# Altium footprint library AHPR_Sensor_Board_Rev1_Footprints.PcbLib: 11 footprints
Each footprint in its own frame and in the unit in brackets; x right, y up, seen from the top. Pads: shape width x height; smd on the part's side, far side on the other; paste and mask are expansions set on the pad; w line width, h text height; cw(c..) or ccw(c..) is an arc to the next point about the centre after c.
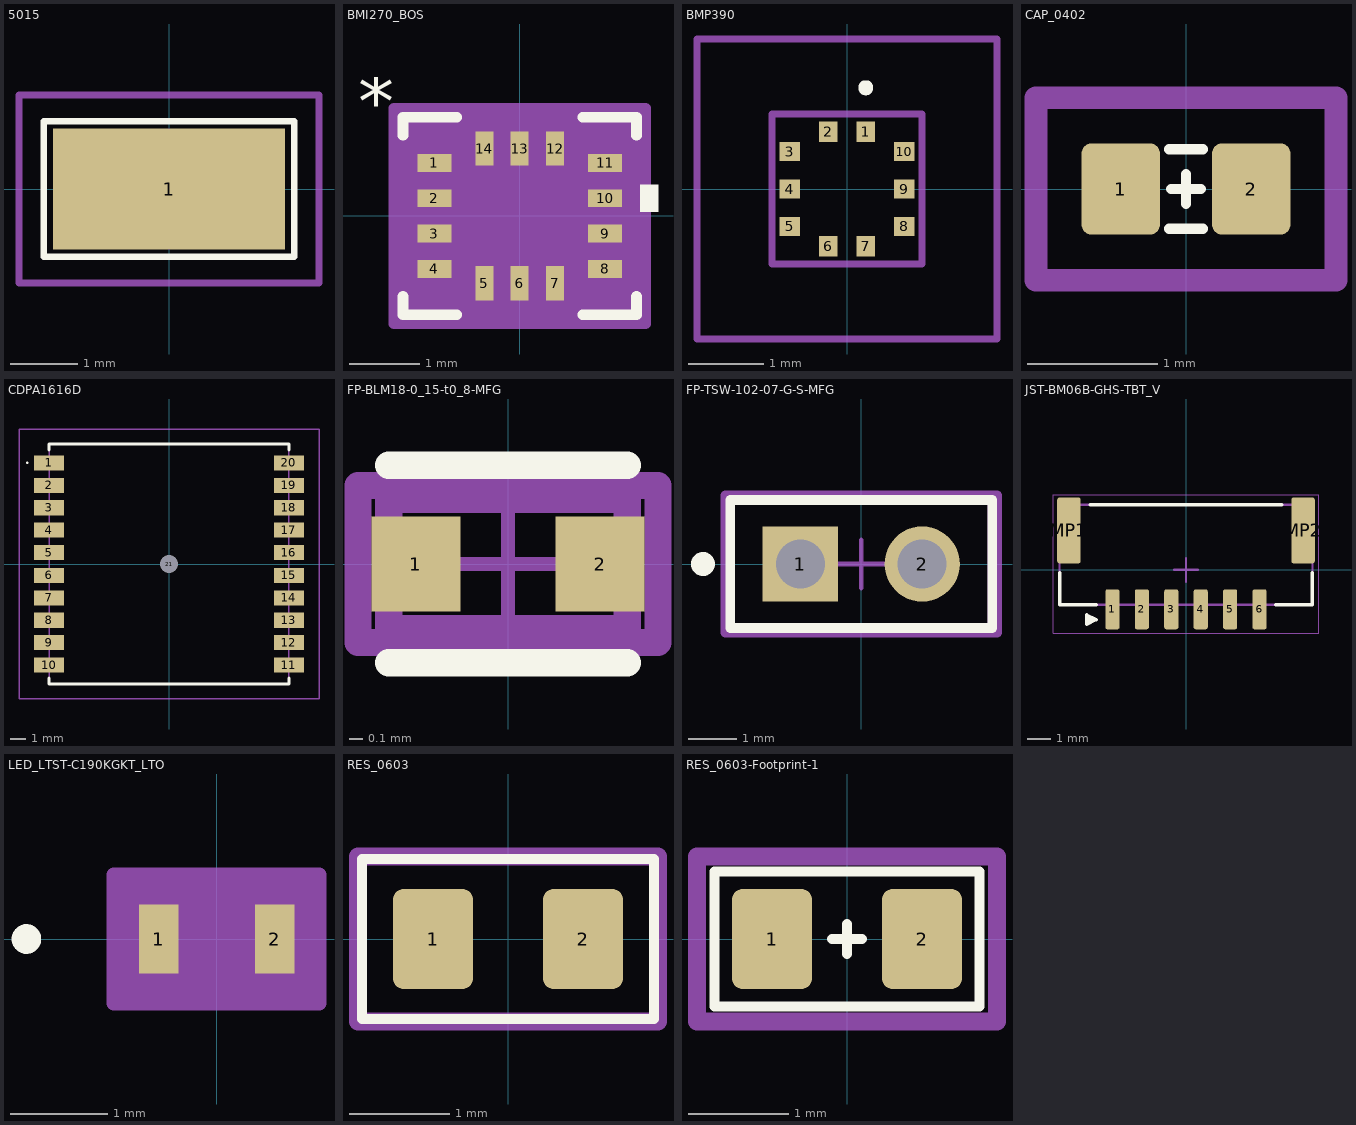
[diagram p0: the footprints below, top view; thin cyan lines are the x and y axes]

## 5015 [mm]
pads (1):
  rect 3.43x1.78 smd: 1(0,0)
Top Overlay:
  lines w0.1: -1.85,-1 1.85,-1 1.85,1 -1.85,1 -1.85,-1
Top Courtyard:
  lines w0.2: -1.335,-0.51 1.335,-0.51 1.335,0.51 -1.335,0.51 -1.335,-0.51
Bottom Assembly:
  lines w0.1: -2.215,-1.39 2.215,-1.39 2.215,1.39 -2.215,1.39 -2.215,-1.39
3D body "5015.stp": height 1.51, standoff 0.01, extent -1.349,-0.5 1.35,0.5

## BMI270_BOS [mil]
pads (14):
  rect 19x10 smd paste+0 mask+0: 1(-47.5,29.53) 2(-47.5,9.84) 3(-47.5,-9.84) 4(-47.5,-29.53) 8(47.5,-29.53) 9(47.5,-9.84) 10(47.5,9.84) 11(47.5,29.53)
  rect 10x19 smd paste+0 mask+0: 5(-19.68,-37.5) 6(0,-37.5) 7(19.68,-37.5) 12(19.68,37.5) 13(0,37.5) 14(-19.68,37.5)
Top Overlay:
  region: 67,17.34 77,17.34 77,2.34 67,2.34
  lines w6: -65,-44.9 -65,-55 -35.06,-55 ; -65,44.9 -65,55 -35.06,55 ; 35.06,-55 65,-55 65,-44.9 ; 35.06,55 65,55 65,44.9
  text "*" at -90,40 h50
Mechanical 13:
  lines w1: -60,0 -10,50 ; -60,-50 60,-50 60,50 -60,50 -60,-50 ; -60,-34.53 -60,-24.53 -57,-24.53 -57,-34.53 -60,-34.53 ; -60,-14.84 -60,-4.84 -57,-4.84 -57,-14.84 -60,-14.84 ; -60,4.84 -60,14.84 -57,14.84 -57,4.84 -60,4.84 ; -60,24.53 -60,34.53 -57,34.53 -57,24.53 -60,24.53 ; -24.68,-50 -14.69,-50 -14.69,-47 -24.68,-47 -24.68,-50 ; -24.68,47 -14.69,47 -14.69,50 -24.68,50 -24.68,47 ; -5,-50 5,-50 5,-47 -5,-47 -5,-50 ; -5,47 5,47 5,50 -5,50 -5,47 ; 14.69,-50 24.68,-50 24.68,-47 14.69,-47 14.69,-50 ; 14.69,47 24.68,47 24.68,50 14.69,50 14.69,47 ; 57,-34.53 60,-34.53 60,-24.53 57,-24.53 57,-34.53 ; 57,-14.84 60,-14.84 60,-4.84 57,-4.84 57,-14.84 ; 57,4.84 60,4.84 60,14.84 57,14.84 57,4.84 ; 57,24.53 60,24.53 60,34.53 57,34.53 57,24.53
  text "*" at -50.5,14.37 h50
Top Courtyard:
  region: -34.69,-60 -70,-60 -70,-44.53 -70,44.53 -70,60 -34.69,60 34.69,60 70,60 70,44.53 70,-44.53 70,-60 34.69,-60
  lines w6: -70,-60 -70,-44.53 -70,44.53 -70,60 -34.69,60 34.69,60 70,60 70,44.53 70,-44.53 70,-60 34.69,-60 -34.69,-60 -70,-60
3D body "BMI270_BOS.step": height 34.09, standoff 0, extent -60,-50 60,50

## BMP390 [mm]
pads (10):
  rect 0.25x0.275 smd: 1(0.25,0.763) 2(-0.25,0.763) 6(-0.25,-0.763) 7(0.25,-0.763)
  rect 0.275x0.25 smd: 3(-0.762,0.5) 4(-0.762,0) 5(-0.762,-0.5) 8(0.762,-0.5) 9(0.762,0) 10(0.762,0.5)
Top Overlay:
  lines w0.1: 0.25,1.3 cw(c0.25,1.35) 0.25,1.4 cw(c0.25,1.35) 0.25,1.3
Top Courtyard:
  lines w0.1: -1,-1 1,-1 1,1 -1,1 -1,-1
Bottom Assembly:
  lines w0.1: -2,-2 2,-2 2,2 -2,2 -2,-2
3D body "10LGA_2X2X0p75_BOS.step": height 0.81, standoff 0, extent -1.029,-1.029 1.029,1.029

## CAP_0402 [mm] "CAP_0402"
pads (2):
  rrect25% 0.6x0.7 smd: 1(-0.5,0) 2(0.5,0)
Top Overlay:
  lines w0.08: -0.127,-0.305 0.127,-0.305 ; -0.127,0.305 0.127,0.305 ; -0.114,0 0.114,0 ; 0,-0.114 0,0.114
Mechanical 13:
  lines w0.175: -1.15,-0.7 1.15,-0.7 1.15,0.7 -1.15,0.7 -1.15,-0.7
  text "'.Designator'" at -5.665,-0.29 h1
3D body "C0402.step": height 0.37, standoff 0.01, extent -0.5,-0.265 0.5,0.265

## CDPA1616D [mm]
pads (21):
  rect 2x1 smd: 1(-8,6.75) 2(-8,5.25) 3(-8,3.75) 4(-8,2.25) 5(-8,0.75) 6(-8,-0.75) 7(-8,-2.25) 8(-8,-3.75) 9(-8,-5.25) 10(-8,-6.75) 11(8,-6.75) 12(8,-5.25) 13(8,-3.75) 14(8,-2.25) 15(8,-0.75) 16(8,0.75) 17(8,2.25) 18(8,3.75) 19(8,5.25) 20(8,6.75)
  round 0.6 hole 1.2 unplated: 21(0,0)
Top Overlay:
  lines w0.1: -9.5,6.75 cw(c-9.45,6.75) -9.4,6.75 cw(c-9.45,6.75) -9.5,6.75
  lines w0.2: -8,-7.6 -8,-8 8,-8 8,-7.6 ; -8,7.6 -8,8 8,8 8,7.6
Top Courtyard:
  lines w0.1: -8,-8 8,-8 8,8 -8,8 -8,-8
Bottom Assembly:
  lines w0.1: -10,-9 10,-9 10,9 -10,9 -10,-9
3D body "CD-PA1616D--3DModel-STEP-56544.STEP": height 6.7, standoff 0, extent -8,-8 8,8

## FP-BLM18-0_15-t0_8-MFG [mm]
pads (2):
  rect 0.65x0.7 smd paste+0 mask+0: 1(-0.675,0) 2(0.675,0)
Top Overlay:
  lines w0.2: -0.875,-0.725 0.875,-0.725 ; -0.875,0.725 0.875,0.725
Top 3D Body:
  lines w0.2: -0.875,-0.475 0.875,-0.475 0.875,0.475 -0.875,0.475 -0.875,-0.475
Top Assembly:
  lines w0.2: -1.1,-0.575 1.1,-0.575 1.1,0.575 -1.1,0.575 -1.1,-0.575
  text ".Designator" at 0,0.188 h1
Top Courtyard:
  lines w0.2: -1.1,-0.575 1.1,-0.575 1.1,0.575 -1.1,0.575 -1.1,-0.575
Top Component Center:
  lines w0.1: -0.5,0 0.5,0 ; 0,-0.5 0,0.5
3D body "FBead_Murata_BLM18EG221SN1D_eec.STEP": height 0.25, standoff 0, extent -1.1,-0.575 1.1,0.575

## FP-TSW-102-07-G-S-MFG [mm]
pads (2):
  rect 1.57x1.57 hole 1.02 paste-2539.97 mask+0: 1(-1.27,0)
  round 1.57 hole 1.02 paste-2539.97 mask+0: 2(1.27,0)
Top Overlay:
  circle w0.25: c-3.3,0 r0.125
  lines w0.2: -2.73,-1.335 2.73,-1.335 2.73,1.335 -2.73,1.335 -2.73,-1.335
Top 3D Body:
  lines w0.2: -2.73,-1.335 2.73,-1.335 2.73,1.335 -2.73,1.335 -2.73,-1.335
Top Assembly:
  lines w0.2: -2.83,-1.435 2.83,-1.435 2.83,1.435 -2.83,1.435 -2.83,-1.435
  text ".Designator" at 0,0.188 h1
Top Courtyard:
  lines w0.2: -2.83,-1.435 2.83,-1.435 2.83,1.435 -2.83,1.435 -2.83,-1.435
Top Component Center:
  lines w0.1: -0.5,0 0.5,0 ; 0,-0.5 0,0.5
3D body "Conn_Samtec_TSW-102-07-G-S_eec.STEP": height 0.25, standoff 0, extent -2.83,-1.435 2.83,1.435

## JST-BM06B-GHS-TBT_V [mm] "Connector, 6-Leads, Body 10.75x4.25mm, Pitch 1.25mm"
height 4.05
pads (8):
  rrect30% 0.6x1.7 smd: 1(-3.125,-1.675) 2(-1.875,-1.675) 3(-0.625,-1.675) 4(0.625,-1.675) 5(1.875,-1.675) 6(3.125,-1.675)
  rrect20% 1x2.8 smd: MP1(-4.975,1.675) MP2(4.975,1.675)
Top Overlay:
  region: -4.225,-2.313 -4.225,-1.913 -3.825,-2.113
  lines w0.15: -5.375,-0.125 -5.375,-1.475 -3.825,-1.475 ; -4.075,2.775 4.075,2.775 ; 3.825,-1.475 5.375,-1.475 5.375,-0.125 ; -4.225,-2.313 -4.225,-1.913 -3.825,-2.113 -4.225,-2.313
Top Assembly:
  lines w0.1: -5.375,-1.475 -5.375,2.775 5.375,2.775 5.375,-1.475 -5.375,-1.475
Top Courtyard:
  lines w0.05: -5.65,-2.7 -5.65,3.2 5.65,3.2 5.65,-2.7 -5.65,-2.7
  lines w0.1: -0.5,0 0.5,0 ; 0,-0.5 0,0.5
Top Designator:
  text ".Designator" at -1.27,0.508 h0.6
3D body "BM06B-GHS-TBT.STEP": height 4.2, standoff 0, extent -5.375,-2.175 5.375,2.775

## LED_LTST-C190KGKT_LTO [mil]
pads (2):
  rect 16x28 smd paste+0 mask+0: 1(-23.5,0) 2(23.5,0)
Top Overlay:
  circle w6: c-77,0 r3
Mechanical 13:
  circle w0: c0,0 r3
  lines w1: -31.5,-16 31.5,-16 31.5,16 -31.5,16 -31.5,-16
Top Courtyard:
  region: -41.5,-24 -41.5,24 -41.5,26 41.5,26 41.5,24 41.5,-24 41.5,-26 -41.5,-26
  lines w6: -41.5,-26 -41.5,-24 -41.5,24 -41.5,26 41.5,26 41.5,24 41.5,-24 41.5,-26 -41.5,-26
3D body "LED_LTST-C190KGKT_LTO.step": height 32.09, standoff 0, extent -31.5,-15.98 31.5,15.98

## RES_0603 [mm]
pads (2):
  rrect25% 0.8x1 smd: 1(-0.75,0) 2(0.75,0)
Top Overlay:
  lines w0.1: -1.46,-0.8 -1.46,0.8 1.46,0.8 1.46,-0.8 -1.46,-0.8
Mechanical 13:
  lines w0.175: -1.5,-0.825 1.5,-0.825 1.5,0.825 -1.5,0.825 -1.5,-0.825
  text "'.Designator'" at -5.665,-0.417 h1
3D body "0603.step": height 0.45, standoff 0, extent -0.8,-0.4 0.8,0.4

## RES_0603-Footprint-1 [mm]
pads (2):
  rrect25% 0.8x1 smd: 1(-0.75,0) 2(0.75,0)
Top Overlay:
  lines w0.1: -0.15,0 0.15,0 ; 0,-0.15 0,0.15 ; -1.325,-0.675 -1.325,0.675 1.325,0.675 1.325,-0.675 -1.325,-0.675
Mechanical 13:
  lines w0.175: -1.5,-0.825 1.5,-0.825 1.5,0.825 -1.5,0.825 -1.5,-0.825
  text "'.Designator'" at -5.665,-0.417 h1
3D body "RES0603.step": height 0.45, standoff 0, extent -0.8,-0.4 0.8,0.4